# EAGLE library part RP2040-ZERO (library RP2040-ZERO)
Check availability <https://pricing.snapeda.com/parts/RP2040-ZERO/Waveshare%20Electronics/view-part?ref=eda>
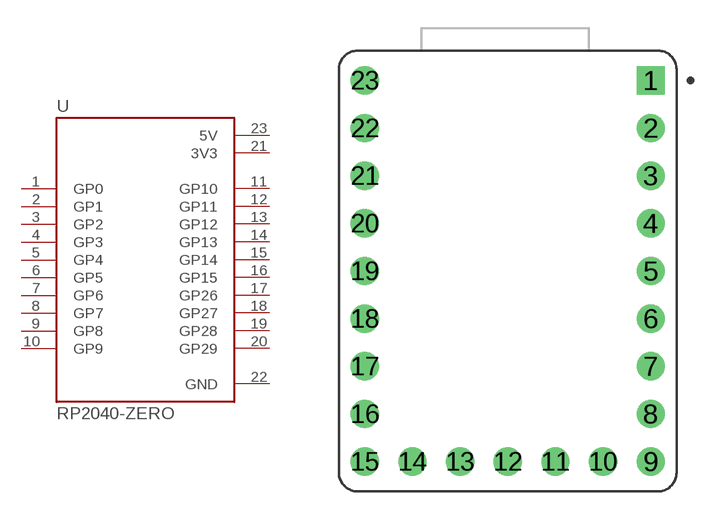
[diagram p0: symbol with the pads of MODULE_RP2040-ZERO; footprint MODULE_RP2040-ZERO]

Designator prefix U

## RP2040-ZERO' (Availability: Not in stock; Check_prices: https://www.snapeda.com/parts/RP2040-ZERO/Waveshare+Electronics/view-part/?ref=eda; Description: Low-Cost, High-Performance Pico-Like MCU Board Based On Raspberry Pi Microcontroller RP2040; MF: Waveshare Electronics; MP: RP2040-ZERO; Package: Package; Price: None; SnapEDA_Link: https://www.snapeda.com/parts/RP2040-ZERO/Waveshare+Electronics/view-part/?ref=snap)  [MODULE_RP2040-ZERO]
1  GP0
2  GP1
3  GP2
4  GP3
5  GP4
6  GP5
7  GP6
8  GP7
9  GP8
10  GP9
11  GP10
12  GP11
13  GP12
14  GP13
15  GP14
16  GP15
17  GP26
18  GP27
19  GP28
20  GP29
21  3V3  pwr
22  GND  pwr
23  5V  pwr

## Footprint MODULE_RP2040-ZERO (pad centres in mm)
drill 1 square: 1 7.62,10.16
drill 1: 2 7.62,7.62; 3 7.62,5.08; 4 7.62,2.54; 5 7.62,0; 6 7.62,-2.54; 7 7.62,-5.08; 8 7.62,-7.62; 9 7.62,-10.16; 10 5.08,-10.16; 11 2.54,-10.16; 12 0,-10.16; 13 -2.54,-10.16; 14 -5.08,-10.16; 15 -7.62,-10.16; 16 -7.62,-7.62; 17 -7.62,-5.08; 18 -7.62,-2.54; 19 -7.62,0; 20 -7.62,2.54; 21 -7.62,5.08; 22 -7.62,7.62; 23 -7.62,10.16